# Altium footprint library PcbLib1.PcbLib: 332 footprints (part 8 of 22)
Each footprint in its own frame and in the unit in brackets; x right, y up, seen from the top. Pads: shape width x height; smd on the part's side, far side on the other; paste and mask are expansions set on the pad; w line width, h text height; cw(c..) or ccw(c..) is an arc to the next point about the centre after c.
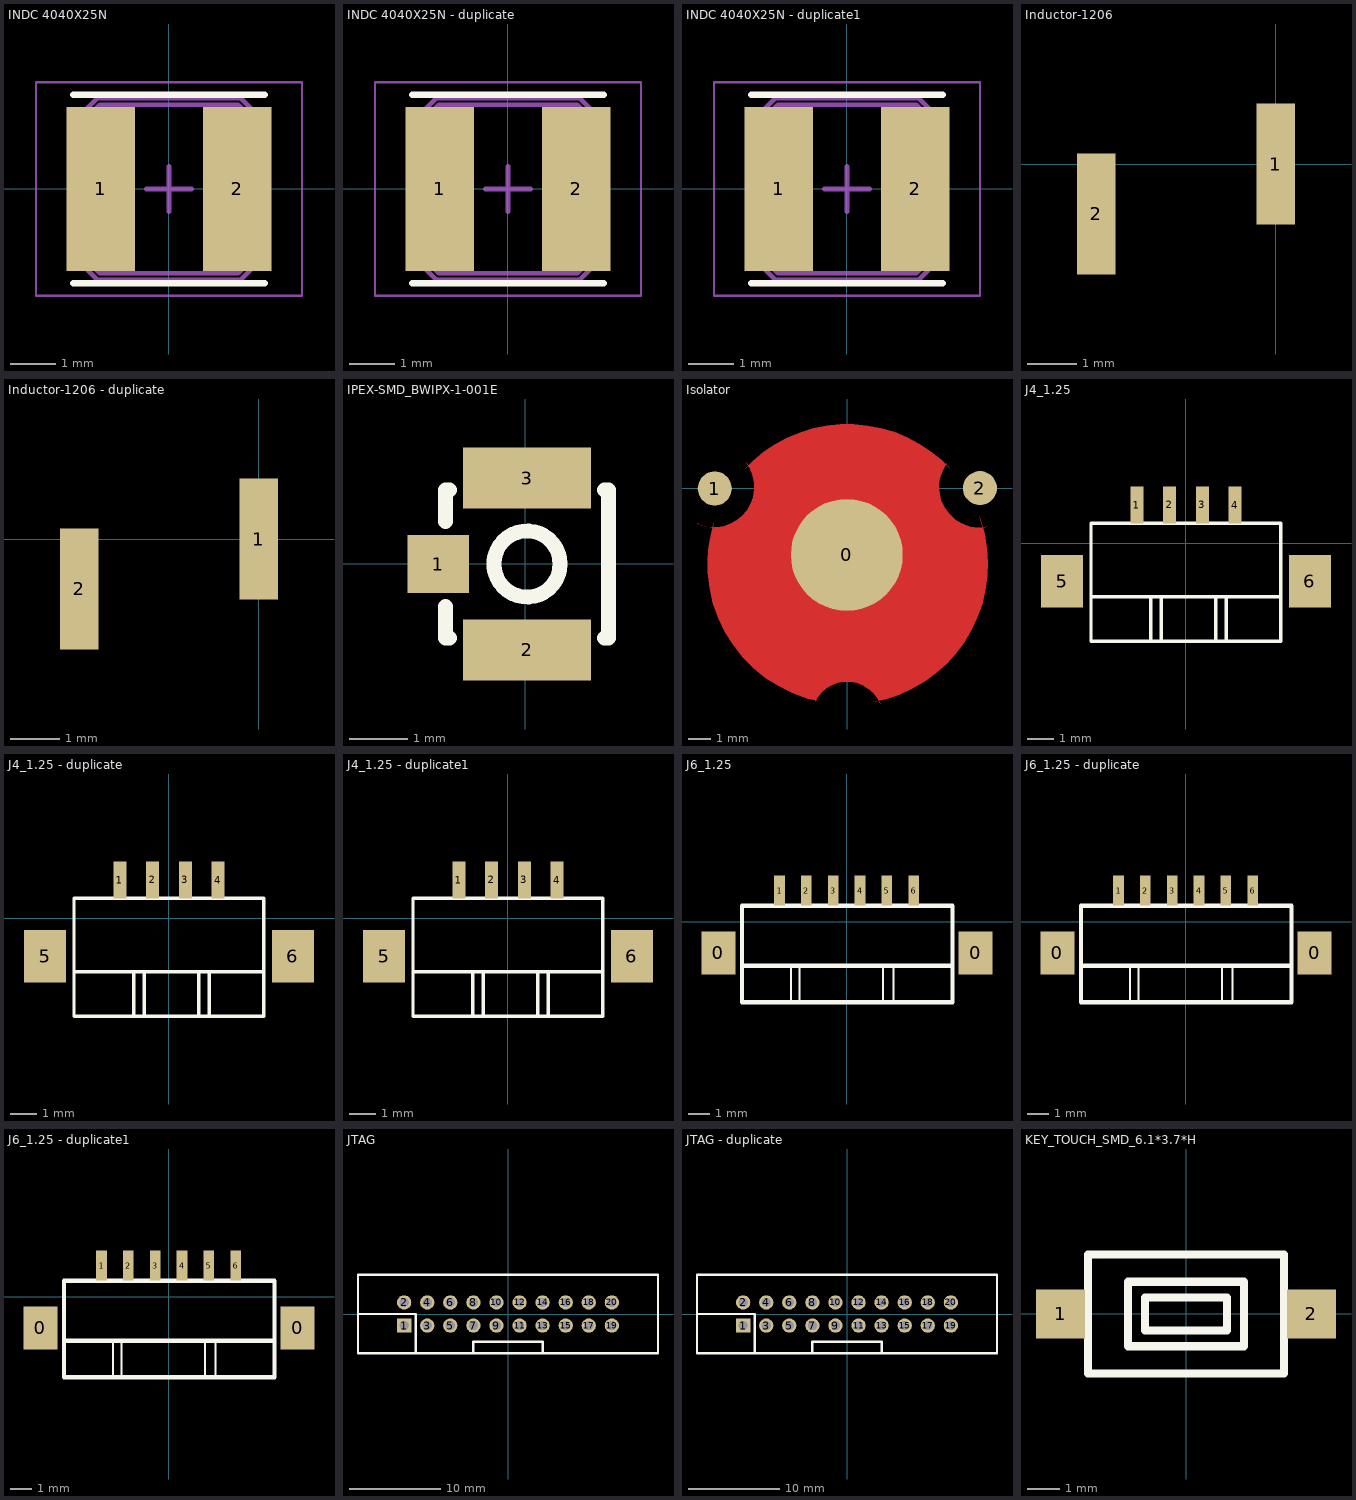
[diagram p7: the footprints below, top view; thin cyan lines are the x and y axes]

## INDC 4040X25N [mm]
height 1.27
pads (2):
  rect 1.5x3.6 smd: 1(-1.5,0) 2(1.5,0)
Top Overlay:
  lines w0.15: -2.1,-2.075 2.1,-2.075 ; -2.1,2.075 2.1,2.075
Mechanical 7:
  lines w0.1: -2,-1.575 -1.575,-2 1.575,-2 2,-1.575 2,1.575 1.575,2 -1.575,2 -2,1.575 -2,-1.575 ; -1.85,-1.525 -1.85,1.525 -1.525,1.85 1.525,1.85 1.85,1.525 1.85,-1.525 1.525,-1.85 -1.525,-1.85 -1.85,-1.525
Mechanical 15:
  lines w0.05: -2.925,-2.35 2.925,-2.35 2.925,2.35 -2.925,2.35 -2.925,-2.35
  lines w0.1: -0.5,0 0.5,0 ; 0,-0.5 0,0.5
3D body "SRN4026 Series.stp": height 2.1, standoff -0.05, extent -1.951,-1.956 1.951,1.955

## INDC 4040X25N - duplicate [mm]
height 1.27
pads (2):
  rect 1.5x3.6 smd: 1(-1.5,0) 2(1.5,0)
Top Overlay:
  lines w0.15: -2.1,-2.075 2.1,-2.075 ; -2.1,2.075 2.1,2.075
Mechanical 7:
  lines w0.1: -2,-1.575 -2,1.575 -1.575,2 1.575,2 2,1.575 2,-1.575 1.575,-2 -1.575,-2 -2,-1.575 ; -1.85,-1.525 -1.525,-1.85 1.525,-1.85 1.85,-1.525 1.85,1.525 1.525,1.85 -1.525,1.85 -1.85,1.525 -1.85,-1.525
Mechanical 15:
  lines w0.05: -2.925,-2.35 -2.925,2.35 2.925,2.35 2.925,-2.35 -2.925,-2.35
  lines w0.1: -0.5,0 0.5,0 ; 0,-0.5 0,0.5
3D body "SRN4026 Series.stp": height 2.1, standoff -0.05, extent -1.951,-1.956 1.951,1.955

## INDC 4040X25N - duplicate1 [mm]
height 1.27
pads (2):
  rect 1.5x3.6 smd: 1(-1.5,0) 2(1.5,0)
Top Overlay:
  lines w0.15: -2.1,-2.075 2.1,-2.075 ; -2.1,2.075 2.1,2.075
Mechanical 7:
  lines w0.1: -2,-1.575 -2,1.575 -1.575,2 1.575,2 2,1.575 2,-1.575 1.575,-2 -1.575,-2 -2,-1.575 ; -1.85,-1.525 -1.525,-1.85 1.525,-1.85 1.85,-1.525 1.85,1.525 1.525,1.85 -1.525,1.85 -1.85,1.525 -1.85,-1.525
Mechanical 15:
  lines w0.05: -2.925,-2.35 -2.925,2.35 2.925,2.35 2.925,-2.35 -2.925,-2.35
  lines w0.1: -0.5,0 0.5,0 ; 0,-0.5 0,0.5
3D body "SRN4026 Series.stp": height 2.1, standoff -0.05, extent -1.951,-1.956 1.951,1.955

## Inductor-1206 [mm] "Coilcraft Micro Spring Air Core Inductors 1206"
pads (2):
  rect 0.79x2.46 smd: 1(0,0) 2(-3.66,-1.02)

## Inductor-1206 - duplicate [mm] "Coilcraft Micro Spring Air Core Inductors 1206"
pads (2):
  rect 0.79x2.46 smd: 1(0,0) 2(-3.66,-1.02)

## IPEX-SMD_BWIPX-1-001E [mm] "IPEX-SMD_BWIPX-1-001E"
pads (3):
  rect 1.05x1 smd: 1(-1.497,-0.005)
  rect 2.2x1.05 smd: 2(0.028,-1.48) 3(0.028,1.47)
Top Overlay:
  circle w0.254: c0.028,-0.005 r0.568
  lines w0.254: -1.37,-0.736 -1.37,-1.275 -1.304,-1.275 ; -1.37,0.726 -1.37,1.265 -1.304,1.265 ; 1.359,-1.275 1.425,-1.275 1.425,-0.736 1.425,0.726 1.425,1.265 1.359,1.265

## Isolator [mil]
height 314.96
pads (3):
  round 196.85 smd: 0(-1,-117)
  round 60 smd: 1(-233.17,-0.36) 2(233.17,0.36)
Top Layer:
  region: 344 vertices and 0 holes, not listed, extent -264.3,-379.09 247.02,112.66
Top Paste:
  drawing of 1 lines, arcs and shapes, not listed
Top Solder:
  drawing of 3 lines, arcs and shapes, not listed

## J4_1.25 [mm]
pads (6):
  rect 0.5x1.4 smd: 1(-1.875,1.45) 2(-0.625,1.45) 3(0.625,1.45) 4(1.875,1.45)
  rect 1.6x2 smd: 5(-4.72,-1.45) 6(4.72,-1.45)
Top Overlay:
  lines w0.127: -3.62,-2.05 3.614,-2.05 ; -1.34,-3.736 -1.34,-2.136 ; -0.94,-3.736 -0.94,-2.136 ; 1.14,-3.736 1.14,-2.136 ; 1.54,-3.736 1.54,-2.136 ; -3.62,-3.75 -3.62,0.75 3.614,0.75 3.614,-3.75 -3.62,-3.75

## J4_1.25 - duplicate [mm]
pads (6):
  rect 0.5x1.4 smd: 1(-1.875,1.45) 2(-0.625,1.45) 3(0.625,1.45) 4(1.875,1.45)
  rect 1.6x2 smd: 5(-4.72,-1.45) 6(4.72,-1.45)
Top Overlay:
  lines w0.127: -3.62,-2.05 3.614,-2.05 ; -1.34,-3.736 -1.34,-2.136 ; -0.94,-3.736 -0.94,-2.136 ; 1.14,-3.736 1.14,-2.136 ; 1.54,-3.736 1.54,-2.136 ; -3.62,-3.75 3.614,-3.75 3.614,0.75 -3.62,0.75 -3.62,-3.75

## J4_1.25 - duplicate1 [mm]
pads (6):
  rect 0.5x1.4 smd: 1(-1.875,1.45) 2(-0.625,1.45) 3(0.625,1.45) 4(1.875,1.45)
  rect 1.6x2 smd: 5(-4.72,-1.45) 6(4.72,-1.45)
Top Overlay:
  lines w0.127: -3.62,-2.05 3.614,-2.05 ; -1.34,-3.736 -1.34,-2.136 ; -0.94,-3.736 -0.94,-2.136 ; 1.14,-3.736 1.14,-2.136 ; 1.54,-3.736 1.54,-2.136 ; -3.62,-3.75 3.614,-3.75 3.614,0.75 -3.62,0.75 -3.62,-3.75

## J6_1.25 [mm]
pads (8):
  rect 1.6x2 smd: 0(-5.988,-1.45) 0(5.988,-1.45)
  rect 0.5x1.4 smd: 1(-3.144,1.45) 2(-1.893,1.45) 3(-0.643,1.45) 4(0.607,1.45) 5(1.857,1.45) 6(3.107,1.45)
Top Overlay:
  lines w0.1: -2.608,-3.736 -2.608,-2.136 ; -2.208,-3.736 -2.208,-2.136 ; 1.672,-3.736 1.672,-2.136 ; 2.173,-3.66 2.173,-2.06
  lines w0.2: -4.888,-2.05 4.915,-2.05 ; -4.888,-3.75 4.915,-3.75 4.915,0.75 -4.888,0.75 -4.888,-3.75

## J6_1.25 - duplicate [mm]
pads (8):
  rect 1.6x2 smd: 0(-5.988,-1.45) 0(5.988,-1.45)
  rect 0.5x1.4 smd: 1(-3.144,1.45) 2(-1.893,1.45) 3(-0.643,1.45) 4(0.607,1.45) 5(1.857,1.45) 6(3.107,1.45)
Top Overlay:
  lines w0.1: -2.608,-3.736 -2.608,-2.136 ; -2.208,-3.736 -2.208,-2.136 ; 1.672,-3.736 1.672,-2.136 ; 2.173,-3.66 2.173,-2.06
  lines w0.2: -4.888,-2.05 4.915,-2.05 ; -4.888,-3.75 -4.888,0.75 4.915,0.75 4.915,-3.75 -4.888,-3.75

## J6_1.25 - duplicate1 [mm]
pads (8):
  rect 1.6x2 smd: 0(-5.988,-1.45) 0(5.988,-1.45)
  rect 0.5x1.4 smd: 1(-3.144,1.45) 2(-1.893,1.45) 3(-0.643,1.45) 4(0.607,1.45) 5(1.857,1.45) 6(3.107,1.45)
Top Overlay:
  lines w0.1: -2.608,-3.736 -2.608,-2.136 ; -2.208,-3.736 -2.208,-2.136 ; 1.672,-3.736 1.672,-2.136 ; 2.173,-3.66 2.173,-2.06
  lines w0.2: -4.888,-2.05 4.915,-2.05 ; -4.888,-3.75 -4.888,0.75 4.915,0.75 4.915,-3.75 -4.888,-3.75

## JTAG [mil]
pads (20):
  rect 62x62 hole 38 slot 38.2 at 0 deg: 1(-450,-50)
  round 62 hole 38 slot 38.2 at 0 deg: 2(-450,50) 3(-350,-50) 4(-350,50) 5(-250,-50) 6(-250,50) 7(-150,-50) 8(-150,50) 9(-50,-50) 10(-50,50) 11(50,-50) 12(50,50) 13(150,-50) 14(150,50) 15(250,-50) 16(250,50) 17(350,-50) 18(350,50) 19(450,-50) 20(450,50)
Top Overlay:
  lines w10: -650,0 -400,0 -400,-170 ; -150,-170 -150,-120 150,-120 150,-170 ; -650,-170 -650,170 650,170 650,-170 -650,-170

## JTAG - duplicate [mil]
pads (20):
  rect 62x62 hole 38 slot 38.2 at 0 deg: 1(-450,-50)
  round 62 hole 38 slot 38.2 at 0 deg: 2(-450,50) 3(-350,-50) 4(-350,50) 5(-250,-50) 6(-250,50) 7(-150,-50) 8(-150,50) 9(-50,-50) 10(-50,50) 11(50,-50) 12(50,50) 13(150,-50) 14(150,50) 15(250,-50) 16(250,50) 17(350,-50) 18(350,50) 19(450,-50) 20(450,50)
Top Overlay:
  lines w10: -650,0 -400,0 -400,-170 ; -150,-170 -150,-120 150,-120 150,-170 ; -650,-170 -650,170 650,170 650,-170 -650,-170

## KEY_TOUCH_SMD_6.1*3.7*H [mil]
pads (2):
  rect 60x60 smd: 1(-153.54,0) 2(153.54,0)
Top Overlay:
  lines w10: -120.08,-72.83 120.08,-72.83 120.08,72.83 -120.08,72.83 -120.08,-72.83 ; -70.87,-39.37 -70.87,39.37 70.87,39.37 70.87,-39.37 -70.87,-39.37 ; -50,-20 50,-20 50,20 -50,20 -50,-20